# Altium schematic symbol library XTAL,8.0000MHz,OSC,50ppm,15pF,SMD.Schlib: 1 symbol
Pins are listed as number, name and electrical type; pins without a type are passive.

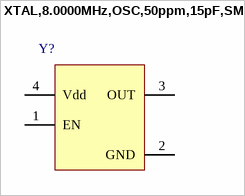
[diagram p0: symbol XTAL,8.0000MHz,OSC,50ppm,15pF,SMD]

## XTAL,8.0000MHz,OSC,50ppm,15pF,SMD
designator Y?
pins: 1 EN, 2 GND, 3 OUT, 4 Vdd